# Altium schematic symbol library 0031.8201.SchLib: 1 symbol
Pins are listed as number, name and electrical type; pins without a type are passive.

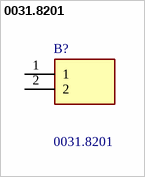
[diagram p0: symbol 0031.8201]

## 0031.8201
designator B?
Fuse Holder Block 10 A 500V 1 Circuit Cartridge Through Hole -40C ~ +85C; Manufacturer_Name: SCHURTER; Geometry.Height: 12.7mm; Manufacturer_Part_Number: 0031.8201; Mouser Part Number: 693-0031.8201; Mouser Price/Stock: https://www.mouser.co.uk/ProductDetail/Schurter/0031.8201?qs=A0AD9A9uYPZ%2F5Y96FqMyAQ%3D%3D; Arrow Part Number: 0031.8201; Arrow Price/Stock: https://www.arrow.com/en/products/0031-8201/schurter.html?utm_currency=USD&region=europe; Datasheet Link: http://www.schurter.com.hk/var/schurter/storage/ilcatalogue/files/document/datasheet/en/pdf/typ_OGN.pdf
footprint 00318201
pins: 1, 2